# Altium footprint library waffle.PcbLib: 13 footprints
Each footprint in its own frame and in the unit in brackets; x right, y up, seen from the top. Pads: shape width x height; smd on the part's side, far side on the other; paste and mask are expansions set on the pad; w line width, h text height; cw(c..) or ccw(c..) is an arc to the next point about the centre after c.
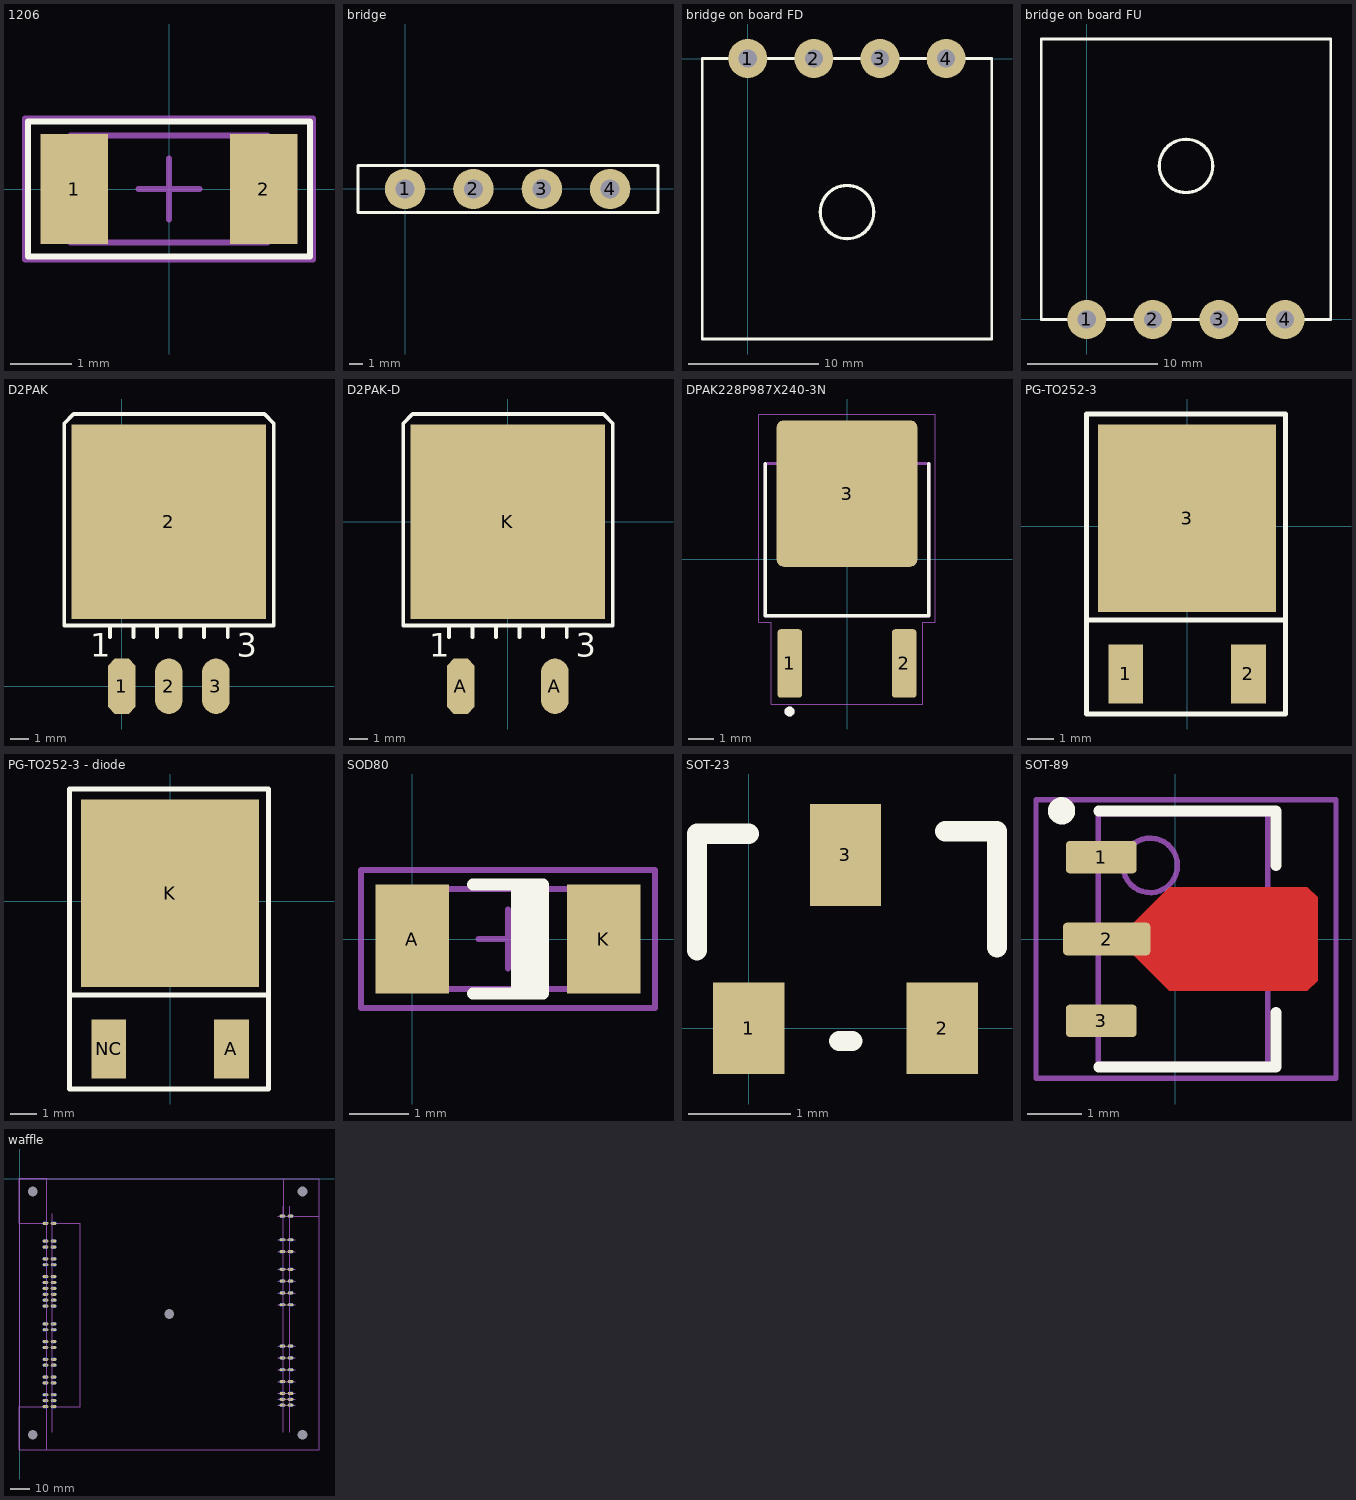
[diagram p0: the footprints below, top view; thin cyan lines are the x and y axes]

## 1206 [mm] "Footprint 1206"
height 0.6
pads (2):
  rect 1.1x1.8 smd: 1(-1.55,0) 2(1.55,0)
Top Overlay:
  lines w0.1: -2.3,-1.1 -2.3,1.1 2.3,1.1 2.3,-1.1 -2.3,-1.1
Mechanical 1:
  lines w0.1: -1.605,-0.875 -1.605,0.875 1.605,0.875 1.605,-0.875 -1.605,-0.875
Mechanical 15:
  lines w0.1: -0.5,0 0.5,0 ; 0,-0.5 0,0.5 ; -2.35,-1.15 -2.35,1.15 2.35,1.15 2.35,-1.15 -2.35,-1.15
3D body: height 0.6, standoff 0, extent 1,-0.875 1.605,0.875
3D body: height 0.6, standoff 0, extent -1,-0.875 0,0.875
3D body: height 0.6, standoff 0, extent -1.605,-0.875 -1,0.875
3D body: height 0.6, standoff 0, extent 0,-0.875 1,0.875

## bridge [mm] "bridge rectifier vertical"
pads (4):
  round 3 hole 1.4: 1(0,0) 2(5.08,0) 3(10.16,0) 4(15.24,0)
Top Overlay:
  lines w0.2: -3.5,-1.75 18.8,-1.75 18.8,1.75 -3.5,1.75 -3.5,-1.75
3D body: height 22, standoff 0, extent -3.5,-1.75 18.75,1.75

## bridge on board FD [mm] "bridge rectifier face down"
pads (4):
  round 3 hole 1.4: 1(0,0) 2(5.08,0) 3(10.16,0) 4(15.24,0)
Top Overlay:
  circle w0.254: c7.625,-11.8 r2.05
  lines w0.2: -3.5,-21.55 18.75,-21.55 18.75,0 -3.5,0 -3.5,-21.55
3D body: height 3.5, standoff 0, extent -3.5,-21.5 18.75,0

## bridge on board FU [mm] "bridge rectifier face up"
height 3.5
pads (4):
  round 3 hole 1.4: 1(0,0) 2(5.08,0) 3(10.16,0) 4(15.24,0)
Top Overlay:
  circle w0.254: c7.625,11.8 r2.05
  lines w0.2: -3.5,0 18.75,0 18.75,21.55 -3.5,21.55 -3.5,0
3D body: height 3.5, standoff 0, extent -3.5,0 18.75,21.5

## D2PAK [mm]
pads (4):
  oct 1.5x3 smd: 1(0,0)
  oval 1.5x3 smd: 2(2.54,0) 3(5.08,0)
  rect 10.5x10.5 smd: 2(2.54,8.882)
Top Overlay:
  lines w0.2: -3.1,3.275 8.2,3.275 ; -3.1,3.3 -3.1,14.2 -2.6,14.7 7.7,14.7 8.2,14.2 8.2,3.3 ; -0.635,2.64 -0.635,3.275 ; 0.635,2.64 0.635,3.275 ; 1.905,2.64 1.905,3.275 ; 3.175,2.64 3.175,3.275 ; 4.445,2.64 4.445,3.275 ; 5.715,2.64 5.715,3.275
  text "1" at -1.7,1.6 h1.27
  text "3" at 6.2,1.6 h1.27
3D body "ddpak3.STEP": height 4.58, standoff 0.01, extent -2.5,-0.794 7.66,13.544

## D2PAK-D [mm]
pads (3):
  oct 1.5x3 smd: A(-2.54,-8.882)
  oval 1.5x3 smd: A(2.54,-8.882)
  rect 10.5x10.5 smd: K(0,0)
Top Overlay:
  lines w0.2: -5.64,-5.607 5.66,-5.607 ; -5.64,-5.582 -5.64,5.318 -5.14,5.818 5.16,5.818 5.66,5.318 5.66,-5.582 ; -3.175,-6.242 -3.175,-5.607 ; -1.905,-6.242 -1.905,-5.607 ; -0.635,-6.242 -0.635,-5.607 ; 0.635,-6.242 0.635,-5.607 ; 1.905,-6.242 1.905,-5.607 ; 3.175,-6.242 3.175,-5.607
  text "1" at -4.24,-7.282 h1.27
  text "3" at 3.66,-7.282 h1.27
3D body "ddpak3.STEP": height 4.58, standoff 0.01, extent -5.04,-9.676 5.12,4.662

## DPAK228P987X240-3N [mm]
pads (3):
  rrect25% 0.98x2.74 smd: 1(-2.286,-4.18) 2(2.286,-4.18)
  rrect10% 5.63x5.86 smd paste-4: 3(0,2.62)
Top Overlay:
  circle w0.2: c-2.3,-6.1 r0.1
  lines w0.127: -3.27,3.825 -3.27,-2.27 3.27,-2.27 3.27,3.825
Mechanical 13:
  circle w0.2: c-2.3,-6.1 r0.1
  lines w0.127: -3.27,-2.27 -3.27,3.825 3.27,3.825 3.27,-2.27 -3.27,-2.27
Mechanical 15:
  lines w0.05: -3.52,-2.52 -3.026,-2.52 -3.026,-5.8 3.026,-5.8 3.026,-2.52 3.52,-2.52 3.52,5.8 -3.52,5.8 -3.52,-2.52
3D body "step_temp.STEP": height 2.4, standoff -0.23, extent -3.27,-5.604 3.27,4.271

## PG-TO252-3 [mm]
pads (3):
  rect 1.3x2.2 smd: 1(-2.29,-5.5) 2(2.29,-5.5)
  rect 6.63x7 smd: 3(0,0.3)
Top Overlay:
  lines w0.2: -3.75,-3.5 3.65,-3.475 ; -3.75,-7 3.675,-7 3.675,4.2 -3.75,4.2 -3.75,-7
3D body: height 0.5, standoff 0, extent 1.75,-6.25 2.75,-3.5
3D body: height 0.5, standoff 0, extent -2.75,-6.25 -1.75,-3.5
3D body: height 2.41, standoff 0, extent -3.75,-3.5 3.75,3.5

## PG-TO252-3 - diode [mm]
pads (3):
  rect 1.3x2.2 smd: A(2.29,-5.5) NC(-2.29,-5.5)
  rect 6.63x7 smd: K(0,0.3)
Top Overlay:
  lines w0.2: -3.75,-3.5 3.65,-3.475 ; -3.75,-7 3.675,-7 3.675,4.2 -3.75,4.2 -3.75,-7
3D body: height 2.41, standoff 0, extent -3.75,-3.5 3.75,3.5
3D body: height 0.5, standoff 0, extent -2.75,-6.25 -1.75,-3.5
3D body: height 0.5, standoff 0, extent 1.75,-6.25 2.75,-3.5

## SOD80 [mm]
pads (2):
  rect 1.25x1.85 smd: A(0,0) K(3.25,0)
Top Overlay:
  region: 2.225,0.925 1.675,0.925 1.675,-0.925 2.225,-0.925
  lines w0.2: 1.025,-0.925 2.225,-0.925 2.225,0.925 1.025,0.925
Mechanical 13:
  region: 3.475,0.85 2.977,0.85 2.977,-0.85 3.475,-0.85
  lines w0.1: -0.225,-0.85 -0.225,0.85 3.475,0.85 3.475,-0.85 -0.225,-0.85
Mechanical 15:
  lines w0.1: 1.125,0 2.125,0 ; 1.625,-0.5 1.625,0.5 ; -0.875,-1.175 -0.875,1.175 4.125,1.175 4.125,-1.175 -0.875,-1.175
3D body: height 1.7, standoff 0, extent -0.225,-0.85 3.475,0.85

## SOT-23 [mm]
pads (3):
  rect 0.7x0.9 smd: 1(0,0) 2(1.9,0)
  rect 0.7x1 smd: 3(0.95,1.7)
Top Overlay:
  lines w0.2: -0.508,0.766 -0.508,1.909 0,1.909 ; 0.889,-0.127 1.016,-0.127 ; 1.93,1.934 2.438,1.934 2.438,0.791
3D body: height 0.4, standoff 0.2, extent 1.708,0.038 2.158,0.448
3D body: height 0.4, standoff 0.2, extent 0.725,1.295 1.175,1.705
3D body: height 0.4, standoff 0.2, extent -0.25,0.045 0.2,0.45
3D body: height 0.2, standoff 0, extent 1.708,-0.402 2.158,0.038
3D body: height 0.2, standoff 0, extent -0.25,-0.402 0.2,0.045
3D body: height 0.2, standoff 0, extent 0.725,1.5 1.175,2.15
3D body: height 1, standoff 0, extent -0.5,0.25 2.45,1.6

## SOT-89 [mm]
height 1.5
pads (3):
  rrect25% 1.3x0.6 smd: 1(-1.354,1.5) 3(-1.354,-1.5)
  rrect25% 1.6x0.6 smd: 2(-1.254,0)
Top Layer:
  region: -0.754,0.3 -0.104,0.95 2.425,0.95 2.613,0.762 2.613,-0.762 2.425,-0.95 -0.104,-0.95 -0.754,-0.3
Top Overlay:
  circle w0.25: c-2.082,2.35 r0.125
  lines w0.2: -1.4,-2.35 1.85,-2.35 1.85,-1.35 ; -1.4,2.35 1.85,2.35 1.85,1.35
Mechanical 12:
  circle w0.1: c-0.457,1.35 r0.5
  lines w0.1: -1.407,-2.3 -1.407,2.3 1.7,2.3 1.7,-2.3 -1.407,-2.3
Mechanical 15:
  lines w0.1: -0.2,0 0.2,0 ; 0,-0.2 0,0.2 ; -2.55,-2.55 -2.55,2.55 2.95,2.55 2.95,-2.55 -2.55,-2.55
3D body "p204_SOT-89.stp": height 1.5, standoff 0, extent -1.754,-2.247 2.346,2.253

## waffle [mm]
pads (221):
  oval 2.5x1.5 smd: 1(13,-22.7) 2(17.4,-22.7) 3(13,-31.7) 4(17.4,-31.7) 5(13,-34.7) 6(17.4,-34.7) 7(13,-40.7) 8(17.4,-40.7) 9(13,-43.7) 10(17.4,-43.7) 11(13,-49.7) 12(17.4,-49.7) 13(13,-52.7) 14(17.4,-52.7) 15(13,-55.7) 16(17.4,-55.7) 17(13,-58.7) 18(17.4,-58.7) 19(13,-61.7) 20(17.4,-61.7) 21(13,-64.7) 22(17.4,-64.7) 23(13,-73.7) 24(17.4,-73.7) 25(13,-76.7) 26(17.4,-76.7) 27(13,-82.7) 28(17.4,-82.7) 29(13,-85.7) 30(17.4,-85.7) 31(13,-91.7) 32(17.4,-91.7) 33(13,-94.7) 34(17.4,-94.7) 35(13,-100.7) 36(17.4,-100.7) 37(13,-103.7) 38(17.4,-103.7) 39(13,-109.7) 40(17.4,-109.7) 41(13,-112.7) 42(17.4,-112.7) 43(13,-115.7) 44(17.4,-115.7) 45(133.3,-19.005) 46(137.7,-19.005) 47(133.3,-31) 48(137.7,-31) 49(133.3,-37) 50(137.7,-37) 51(133.3,-46) 52(137.7,-46) 53(133.3,-52) 54(137.7,-52) 55(133.3,-58) 56(137.7,-58) 57(133.3,-64) 58(137.7,-64) 59(133.3,-85) 60(137.7,-85) 61(133.3,-91) 62(137.7,-91) 63(133.3,-97) 64(137.7,-97) 65(133.3,-103) 66(137.7,-103) 67(133.3,-109) 68(137.7,-109) 69(133.3,-112) 70(137.7,-112) 71(133.3,-115) 72(137.7,-115)
  oval 2.5x1.5 smd far side: 1(13,-22.7) 2(17.4,-22.7) 3(13,-31.7) 4(17.4,-31.7) 5(13,-34.7) 6(17.4,-34.7) 7(13,-40.7) 8(17.4,-40.7) 9(13,-43.7) 10(17.4,-43.7) 11(13,-49.7) 12(17.4,-49.7) 13(13,-52.7) 14(17.4,-52.7) 15(13,-55.7) 16(17.4,-55.7) 17(13,-58.7) 18(17.4,-58.7) 19(13,-61.7) 20(17.4,-61.7) 21(13,-64.7) 22(17.4,-64.7) 23(13,-73.7) 24(17.4,-73.7) 25(13,-76.7) 26(17.4,-76.7) 27(13,-82.7) 28(17.4,-82.7) 29(13,-85.7) 30(17.4,-85.7) 31(13,-91.7) 32(17.4,-91.7) 33(13,-94.7) 34(17.4,-94.7) 35(13,-100.7) 36(17.4,-100.7) 37(13,-103.7) 38(17.4,-103.7) 39(13,-109.7) 40(17.4,-109.7) 41(13,-112.7) 42(17.4,-112.7) 43(13,-115.7) 44(17.4,-115.7) 45(133.3,-19.005) 46(137.7,-19.005) 47(133.3,-31) 48(137.7,-31) 49(133.3,-37) 50(137.7,-37) 51(133.3,-46) 52(137.7,-46) 53(133.3,-52) 54(137.7,-52) 55(133.3,-58) 56(137.7,-58) 57(133.3,-64) 58(137.7,-64) 59(133.3,-85) 60(137.7,-85) 61(133.3,-91) 62(137.7,-91) 63(133.3,-97) 64(137.7,-97) 65(133.3,-103) 66(137.7,-103) 67(133.3,-109) 68(137.7,-109) 69(133.3,-112) 70(137.7,-112) 71(133.3,-115) 72(137.7,-115)
  oval 1.8x1.5 hole 1.1: 1(13.7,-22.7) 2(16.7,-22.7) 3(13.7,-31.7) 4(16.7,-31.7) 5(13.7,-34.7) 6(16.7,-34.7) 7(13.7,-40.7) 8(16.7,-40.7) 9(13.7,-43.7) 10(16.7,-43.7) 11(13.7,-49.7) 12(16.7,-49.7) 13(13.7,-52.7) 14(16.7,-52.7) 15(13.7,-55.7) 16(16.7,-55.7) 17(13.7,-58.7) 18(16.7,-58.7) 19(13.7,-61.7) 20(16.7,-61.7) 21(13.7,-64.7) 22(16.7,-64.7) 23(13.7,-73.7) 24(16.7,-73.7) 25(13.7,-76.7) 26(16.7,-76.7) 27(13.7,-82.7) 28(16.7,-82.7) 29(13.7,-85.7) 30(16.7,-85.7) 31(13.7,-91.7) 32(16.7,-91.7) 33(13.7,-94.7) 34(16.7,-94.7) 35(13.7,-100.7) 36(16.7,-100.7) 37(13.7,-103.7) 38(16.7,-103.7) 39(13.7,-109.7) 40(16.7,-109.7) 41(13.7,-112.7) 42(16.7,-112.7) 43(13.7,-115.7) 44(16.7,-115.7) 45(134,-19.005) 46(137,-19.005) 47(134,-31) 48(137,-31) 49(134,-37) 50(137,-37) 51(134,-46) 52(137,-46) 53(134,-52) 54(137,-52) 55(134,-58) 56(137,-58) 57(134,-64) 58(137,-64) 59(134,-85) 60(137,-85) 61(134,-91) 62(137,-91) 63(134,-97) 64(137,-97) 65(134,-103) 66(137,-103) 67(134,-109) 68(137,-109) 69(134,-112) 70(137,-112) 71(134,-115) 72(137,-115)
  round 0 hole 5: S(6.7,-130) S(6.7,-6.5) S(76,-68.75) S(143.7,-130) S(143.7,-6.5)
Mechanical 17:
  lines w0.2: 0,-137.5 0,0 152,0 152,-137.5 0,-137.5
Mechanical 19:
  lines w0.2: 13.7,-128.7 13.7,-17.7 ; 16.7,-128.7 16.7,-17.7 ; 131,-115 140,-115 ; 131,-112 140,-112 ; 131,-109 140,-109 ; 131,-103 140,-103 ; 131,-97 140,-97 ; 131,-91 140,-91 ; 131,-85 140,-85 ; 131,-63.91 140,-63.91 ; 131,-58.11 140,-58.11 ; 131,-52.005 140,-52.005 ; 131,-46.005 140,-46.005 ; 131,-37.014 140,-37.014 ; 131,-31 140,-31 ; 131,-19 140,-19 ; 133.95,-128.7 133.95,-14 ; 136.95,-128.75 136.95,-14 ; -0.3,-137.7 -0.3,-115.7 13.7,-115.7 13.7,-137.7 -0.3,-137.7 ; -0.3,-22.7 -0.3,0.3 13.7,0.3 13.7,-22.7 -0.3,-22.7 ; 16.7,-115.7 16.7,-22.7 30.7,-22.7 30.7,-115.7 16.7,-115.7 ; 134,-19 134,0 152,0 152,-19 134,-19